# Altium schematic symbol library LAN8742A-CZ-TR.SchLib: 1 symbol
Pins are listed as number, name and electrical type; pins without a type are passive.

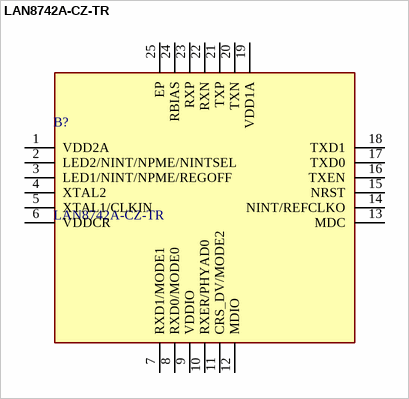
[diagram p0: symbol LAN8742A-CZ-TR]

## LAN8742A-CZ-TR
designator B?
Ethernet ICs; Manufacturer_Name: Microchip; Geometry.Height: 1mm; Mouser Part Number: 579-LAN8742A-CZ-TR; Mouser Price/Stock: https://www.mouser.co.uk/ProductDetail/Microchip-Technology/LAN8742A-CZ-TR?qs=6qKXPk0vzx0Y6uPCt7MXWw%3D%3D; Manufacturer_Part_Number: LAN8742A-CZ-TR; Datasheet Link: http://ww1.microchip.com/downloads/en/DeviceDoc/8742a.pdf
footprint QFN50P400X400X100-25N-D
pins: 1 VDD2A, 2 LED2/NINT/NPME/NINTSEL, 3 LED1/NINT/NPME/REGOFF, 4 XTAL2, 5 XTAL1/CLKIN, 6 VDDCR, 7 RXD1/MODE1, 8 RXD0/MODE0, 9 VDDIO, 10 RXER/PHYAD0, 11 CRS_DV/MODE2, 12 MDIO, 13 MDC, 14 NINT/REFCLKO, 15 NRST, 16 TXEN, 17 TXD0, 18 TXD1, 19 VDD1A, 20 TXN, 21 TXP, 22 RXN, 23 RXP, 24 RBIAS, 25 EP